# Altium schematic symbol library BZX84-C4V7,215.SchLib: 1 symbol
Pins are listed as number, name and electrical type; pins without a type are passive.

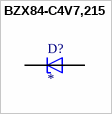
[diagram p0: symbol BZX84-C4V7,215]

## BZX84-C4V7,215
designator D?
MF: {'manufacturer': u'Nexperia USA Inc.'}; MP: BZX84-C4V7,215; Package: None; Price: None; Value: *; Availability: Unavailable
footprint SOT95P230X110-3N
pins: 1 A, 3 C